# Altium footprint library 未分类IC.PcbLib: 46 footprints (part 3 of 3)
Each footprint in its own frame and in the unit in brackets; x right, y up, seen from the top. Pads: shape width x height; smd on the part's side, far side on the other; paste and mask are expansions set on the pad; w line width, h text height; cw(c..) or ccw(c..) is an arc to the next point about the centre after c.
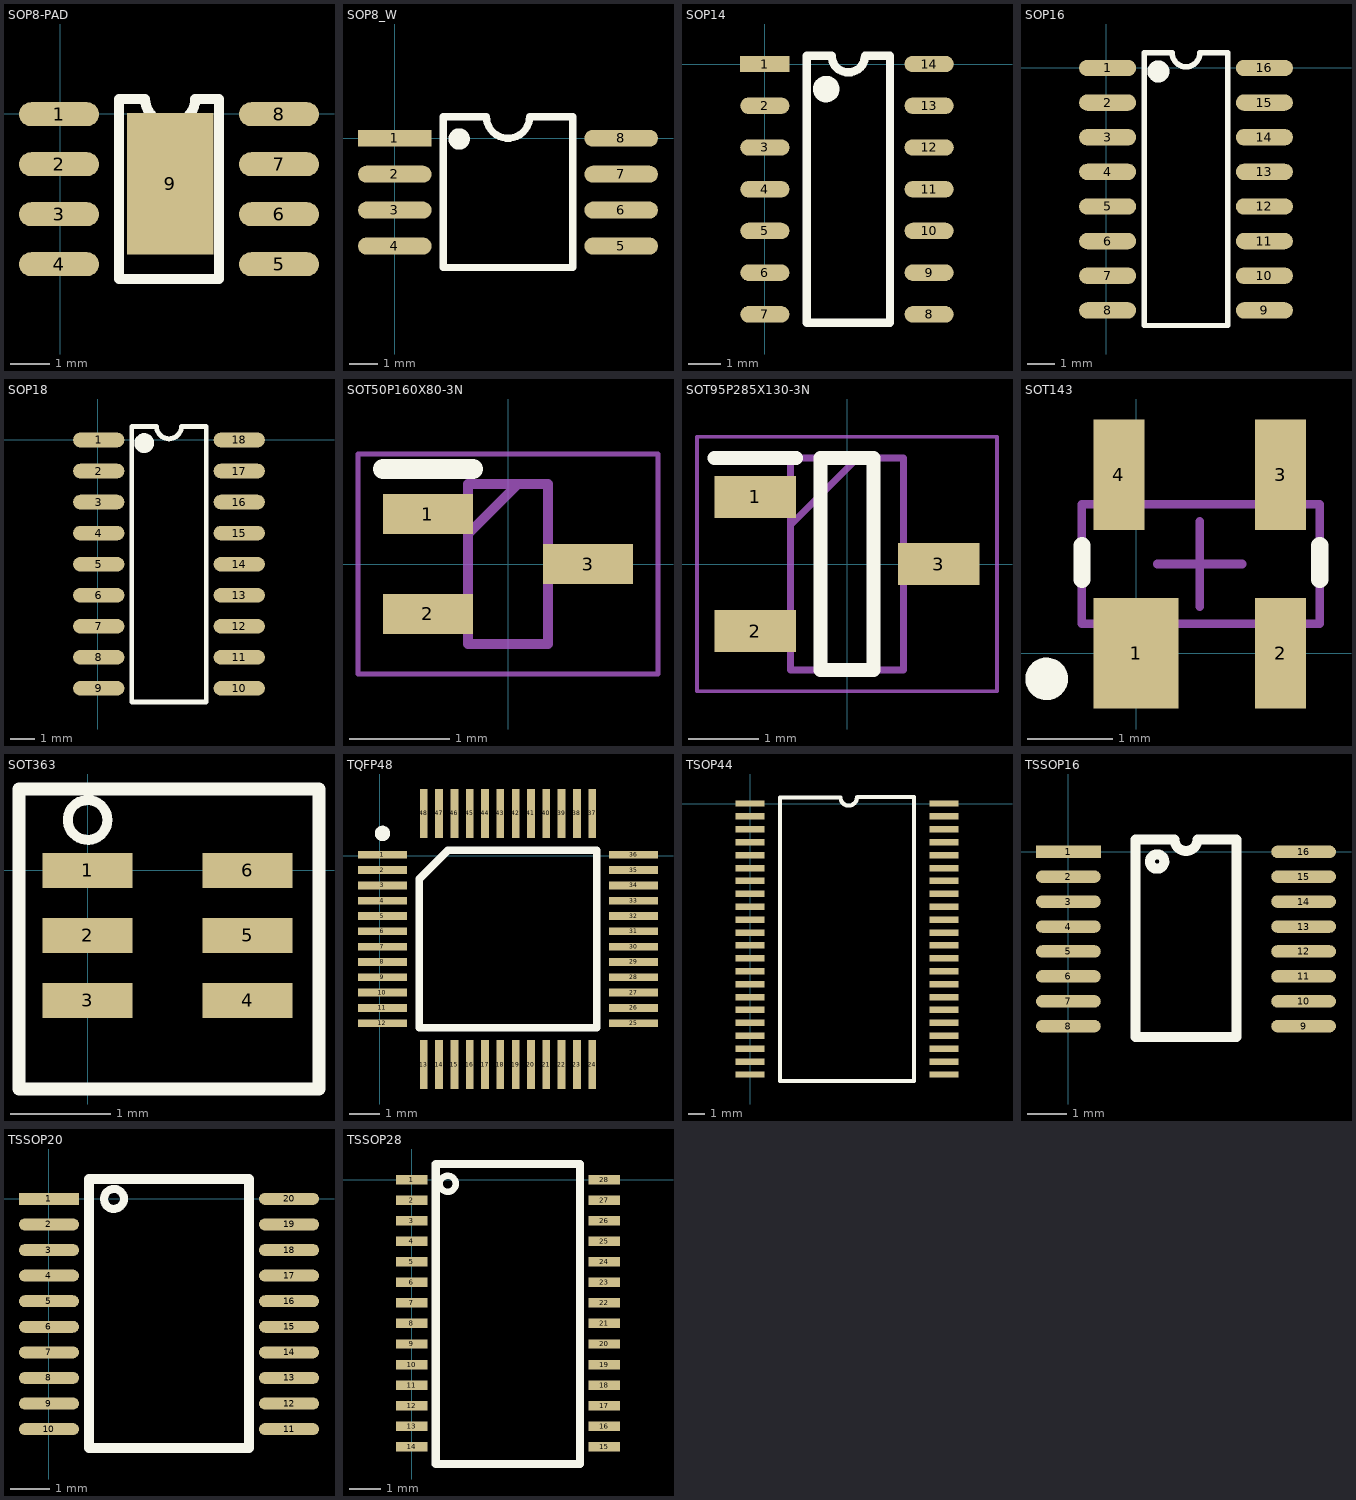
[diagram p2: the footprints below, top view; thin cyan lines are the x and y axes]

## SOP8-PAD [mil]
pads (9):
  oval 80x24 smd: 1(-1.24,-0.45) 2(-1.24,-50.45) 3(-1.24,-100.45) 4(-1.24,-150.45) 5(218.76,-150.45) 6(218.76,-100.45) 7(218.76,-50.45) 8(218.76,-0.45)
  rect 86.61x141.73 smd: 9(110,-70)
Top Overlay:
  lines w10: 58.76,-165 58.76,15 85,15 ccw(c110,15) 135,15 158.76,15 158.76,-165 58.76,-165
3D body "SOP8.STEP": height 74.8, standoff 0.03, extent -5,-175 231.44,21.85

## SOP8_W [mm]
pads (8):
  rect 2.6x0.6 smd: 1(0,0)
  oval 2.6x0.6 smd: 2(0,-1.27) 3(0,-2.54) 4(0,-3.81) 5(8,-3.81) 6(8,-2.54) 7(8,-1.27) 8(8,0)
Top Overlay:
  circle w0.5: c2.273,-0.025 r0.127
  lines w0.254: 1.714,-4.572 1.714,0.762 3.238,0.762 ccw(c4,0.762) 4.762,0.762 6.286,0.762 6.286,-4.572 1.714,-4.572
3D body "SOP8W.STEP": height 1.9, standoff 0, extent 0.057,-4.518 7.943,0.762

## SOP14 [mm]
pads (14):
  rect 1.5x0.5 smd: 1(0,0)
  oval 1.5x0.5 smd: 2(0,-1.27) 3(0,-2.54) 4(0,-3.81) 5(0,-5.08) 6(0,-6.35) 7(0,-7.62) 8(5,-7.62) 9(5,-6.35) 10(5,-5.08) 11(5,-3.81) 12(5,-2.54) 13(5,-1.27) 14(5,0)
Top Overlay:
  circle w0.5: c1.865,-0.762 r0.155
  lines w0.254: 1.27,-7.874 3.81,-7.874 3.81,0.254 3.048,0.254 cw(c2.54,0.254) 2.54,-0.254 cw(c2.54,0.254) 2.032,0.254 1.27,0.254 1.27,-7.874
3D body "SOP14.STEP": height 1.61, standoff 0, extent -0.56,-8.16 5.64,0.54

## SOP16 [mm]
pads (16):
  oval 2.1x0.6 smd: 1(0.046,0) 2(0.046,-1.27) 3(0.046,-2.54) 4(0.046,-3.81) 5(0.046,-5.08) 6(0.046,-6.35) 7(0.046,-7.62) 8(0.046,-8.89) 9(5.796,-8.89) 10(5.796,-7.62) 11(5.796,-6.35) 12(5.796,-5.08) 13(5.796,-3.81) 14(5.796,-2.54) 15(5.796,-1.27) 16(5.796,0)
Top Overlay:
  circle w0.5: c1.905,-0.127 r0.155
  lines w0.2: 1.397,0.555 1.397,-9.445 4.445,-9.445 4.445,0.555
  lines w0.203: 1.397,0.555 2.413,0.555 ccw(c2.921,0.555) 2.921,0.047 ccw(c2.921,0.555) 3.429,0.555 4.445,0.555
3D body "SOP16.STEP": height 1.9, standoff 0, extent -0.152,-9.47 5.853,0.53

## SOP18 [mm]
pads (18):
  oval 2.1x0.6 smd: 1(0.046,0) 2(0.046,-1.27) 3(0.046,-2.54) 4(0.046,-3.81) 5(0.046,-5.08) 6(0.046,-6.35) 7(0.046,-7.62) 8(0.046,-8.89) 9(0.046,-10.16) 10(5.796,-10.16) 11(5.796,-8.89) 12(5.796,-7.62) 13(5.796,-6.35) 14(5.796,-5.08) 15(5.796,-3.81) 16(5.796,-2.54) 17(5.796,-1.27) 18(5.796,0)
Top Overlay:
  circle w0.5: c1.905,-0.127 r0.155
  lines w0.2: 1.397,0.555 1.397,-10.715 4.445,-10.715 4.445,0.555
  lines w0.203: 1.397,0.555 2.413,0.555 ccw(c2.921,0.555) 2.921,0.047 ccw(c2.921,0.555) 3.429,0.555 4.445,0.555
3D body "SOP18.STEP": height 1.9, standoff 0, extent -0.107,-10.89 5.898,0.61

## SOT50P160X80-3N [mm]
pads (3):
  rect 0.9x0.4 smd: 1(-0.8,0.5) 2(-0.8,-0.5) 3(0.8,0)
Top Overlay:
  lines w0.2: -1.25,0.95 -0.35,0.95
Mechanical 13:
  lines w0.1: -0.4,0.3 0.1,0.8 ; -0.4,-0.8 -0.4,0.8 0.4,0.8 0.4,-0.8 -0.4,-0.8
Mechanical 15:
  lines w0.05: -1.5,-1.1 -1.5,1.1 1.5,1.1 1.5,-1.1 -1.5,-1.1
3D body "DMG1012T-7.stp": height 0.8, standoff 0, extent -0.8,-0.8 0.8,0.8

## SOT95P285X130-3N [mm]
pads (3):
  rect 1.15x0.6 smd: 1(-1.3,0.95) 2(-1.3,-0.95) 3(1.3,0)
Top Overlay:
  lines w0.2: -1.875,1.5 -0.725,1.5 ; -0.375,-1.5 -0.375,1.5 0.375,1.5 0.375,-1.5 -0.375,-1.5
Mechanical 13:
  lines w0.1: -0.8,0.55 0.15,1.5 ; -0.8,-1.5 -0.8,1.5 0.8,1.5 0.8,-1.5 -0.8,-1.5
Mechanical 15:
  lines w0.05: -2.125,-1.8 -2.125,1.8 2.125,1.8 2.125,-1.8 -2.125,-1.8
3D body "AP2331W-7.stp": height 1.3, standoff 0, extent -1.425,-1.5 1.425,1.5

## SOT143 [mm]
pads (4):
  rect 1x1.3 smd: 1(0,0)
  rect 0.6x1.3 smd: 2(1.7,0) 3(1.7,2.1) 4(-0.2,2.1)
Top Overlay:
  circle w0.25: c-1.05,-0.3 r0.125
  lines w0.2: -0.635,0.87 -0.635,1.27 ; 2.159,0.87 2.159,1.27
Mechanical 13:
  lines w0.1: -0.635,0.35 2.159,0.35 2.159,1.75 -0.635,1.75 -0.635,0.35
Mechanical 15:
  lines w0.1: 0.25,1.05 1.25,1.05 ; 0.75,0.55 0.75,1.55
3D body "User Library-SOT143-1.STEP": height 1.22, standoff 0, extent -0.688,-0.165 2.212,2.198

## SOT363 [mm]
pads (6):
  rect 0.9x0.35 smd: 1(0,0) 2(0,-0.65) 3(0,-1.3) 4(1.6,-1.3) 5(1.6,-0.65) 6(1.6,0)
Top Overlay:
  circle w0.1: c0,0.503 r0.198
  lines w0.127: -0.686,-2.187 -0.686,0.813 2.314,0.813 2.314,-2.187 -0.686,-2.187
3D body "SC70-6.STEP": height 0.43, standoff -0.53, extent -0.262,-1.66 1.838,0.34

## TQFP48 [mm]
pads (48):
  rect 1.6x0.254 smd: 1(0.095,0.03) 2(0.095,-0.47) 3(0.095,-0.97) 4(0.095,-1.47) 5(0.095,-1.97) 6(0.095,-2.47) 7(0.095,-2.97) 8(0.095,-3.47) 9(0.095,-3.97) 10(0.095,-4.47) 11(0.095,-4.97) 12(0.095,-5.47) 25(8.295,-5.47) 26(8.295,-4.97) 27(8.295,-4.47) 28(8.295,-3.97) 29(8.295,-3.47) 30(8.295,-2.97) 31(8.295,-2.47) 32(8.295,-1.97) 33(8.295,-1.47) 34(8.295,-0.97) 35(8.295,-0.47) 36(8.295,0.03)
  rect 0.254x1.6 smd: 13(1.445,-6.82) 14(1.945,-6.82) 15(2.445,-6.82) 16(2.945,-6.82) 17(3.445,-6.82) 18(3.945,-6.82) 19(4.445,-6.82) 20(4.945,-6.82) 21(5.445,-6.82) 22(5.945,-6.82) 23(6.445,-6.82) 24(6.945,-6.82) 37(6.945,1.38) 38(6.445,1.38) 39(5.945,1.38) 40(5.445,1.38) 41(4.945,1.38) 42(4.445,1.38) 43(3.945,1.38) 44(3.445,1.38) 45(2.945,1.38) 46(2.445,1.38) 47(1.945,1.38) 48(1.445,1.38)
Top Overlay:
  circle w0.25: c0.095,0.73 r0.125
  lines w0.2: 1.295,-5.62 7.095,-5.62 7.095,0.18
  lines w0.254: 1.295,-0.762 2.237,0.18 ; 1.295,-0.762 1.295,-5.62 7.095,-5.62 7.095,0.18 2.921,0.18 2.237,0.18 ; 1.295,-0.762 2.237,0.18
3D body "TQFP48.STEP": height 1.1, standoff 0, extent -0.318,-7.239 8.7,1.778

## TSOP44 [mm]
pads (44):
  rect 1.8x0.4 smd: 1(-0.009,0.001) 2(-0.009,-0.799) 3(-0.009,-1.599) 4(-0.009,-2.399) 5(-0.009,-3.199) 6(-0.009,-3.999) 7(-0.009,-4.799) 8(-0.009,-5.599) 9(-0.009,-6.399) 10(-0.009,-7.199) 11(-0.009,-7.999) 12(-0.009,-8.799) 13(-0.009,-9.599) 14(-0.009,-10.399) 15(-0.009,-11.199) 16(-0.009,-11.999) 17(-0.009,-12.799) 18(-0.009,-13.599) 19(-0.009,-14.399) 20(-0.009,-15.199) 21(-0.009,-15.999) 22(-0.009,-16.799) 23(11.991,-16.799) 24(11.991,-15.999) 25(11.991,-15.199) 26(11.991,-14.399) 27(11.991,-13.599) 28(11.991,-12.799) 29(11.991,-11.999) 30(11.991,-11.199) 31(11.991,-10.399) 32(11.991,-9.599) 33(11.991,-8.799) 34(11.991,-7.999) 35(11.991,-7.199) 36(11.991,-6.399) 37(11.991,-5.599) 38(11.991,-4.799) 39(11.991,-3.999) 40(11.991,-3.199) 41(11.991,-2.399) 42(11.991,-1.599) 43(11.991,-0.799) 44(11.991,0.001)
Top Overlay:
  lines w0.2: 1.826,-17.199 10.156,-17.199
  lines w0.254: 1.826,0.361 1.826,-17.199 ; 1.846,-17.18 1.826,-17.199 ; 1.846,0.381 5.588,0.381 ccw(c6.096,0.381) 6.604,0.381 ; 6.624,0.401 10.156,0.401 10.156,-17.199 1.826,-17.199
3D body "TSOP2-44_IS62WV51216.STEP": height 1.3, standoff -0.09, extent 0.127,-17.499 11.887,0.711

## TSSOP16 [mil]
pads (16):
  rect 65x12.5 smd: 1(0,0)
  oval 65x12.5 smd: 2(0,-25) 3(0,-50) 4(0,-75) 5(0,-100) 6(0,-125) 7(0,-150) 8(0,-175) 9(236,-175) 10(236,-150) 11(236,-125) 12(236,-100) 13(236,-75) 14(236,-50) 15(236,-25) 16(236,0)
Top Overlay:
  lines w10: 89,-17 cw(c89,-9.79) 90.02,-16.93 ; 67.5,-186 67.5,12.5 106.46,12.5 ccw(c118,12.5) 129.54,12.5 168.5,12.5 168.5,-186 67.5,-186
3D body "TSSOP-16.STEP": height 43.31, standoff 0, extent -6.98,-186.42 244.99,10.43

## TSSOP20 [mil]
pads (20):
  rect 60x12 smd: 1(0,0)
  oval 60x12 smd: 2(0,-25.59) 3(0,-51.18) 4(0,-76.77) 5(0,-102.36) 6(0,-127.95) 7(0,-153.54) 8(0,-179.13) 9(0,-204.72) 10(0,-230.31) 11(240.16,-230.31) 12(240.16,-204.72) 13(240.16,-179.13) 14(240.16,-153.54) 15(240.16,-127.95) 16(240.16,-102.36) 17(240.16,-76.77) 18(240.16,-51.18) 19(240.16,-25.59) 20(240.16,0)
Top Overlay:
  circle w8: c65,0 r10
  lines w10: 40,-249.02 200,-249.02 200,20 40,20 40,-249.02
3D body "TSSOP-20.STEP": height 47.24, standoff 0, extent -11.92,-245.84 247.92,14

## TSSOP28 [mm]
pads (28):
  rect 1x0.3 smd: 1(0,0) 2(0,-0.65) 3(0,-1.3) 4(0,-1.95) 5(0,-2.6) 6(0,-3.25) 7(0,-3.9) 8(0,-4.55) 9(0,-5.2) 10(0,-5.85) 11(0,-6.5) 12(0,-7.15) 13(0,-7.8) 14(0,-8.45) 15(6.1,-8.45) 16(6.1,-7.8) 17(6.1,-7.15) 18(6.1,-6.5) 19(6.1,-5.85) 20(6.1,-5.2) 21(6.1,-4.55) 22(6.1,-3.9) 23(6.1,-3.25) 24(6.1,-2.6) 25(6.1,-1.95) 26(6.1,-1.3) 27(6.1,-0.65) 28(6.1,0)
Top Overlay:
  circle w0.203: c1.143,-0.127 r0.254
  lines w0.254: 0.762,-9 0.762,0.5 5.334,0.5 5.334,-9 0.762,-9
3D body "TSSOP-28.STEP": height 0.52, standoff -0.47, extent -0.127,-9.042 6.273,0.658